# Altium footprint library IC-QFN.PcbLib: 94 footprints (part 2 of 6)
Each footprint in its own frame and in the unit in brackets; x right, y up, seen from the top. Pads: shape width x height; smd on the part's side, far side on the other; paste and mask are expansions set on the pad; w line width, h text height; cw(c..) or ccw(c..) is an arc to the next point about the centre after c.
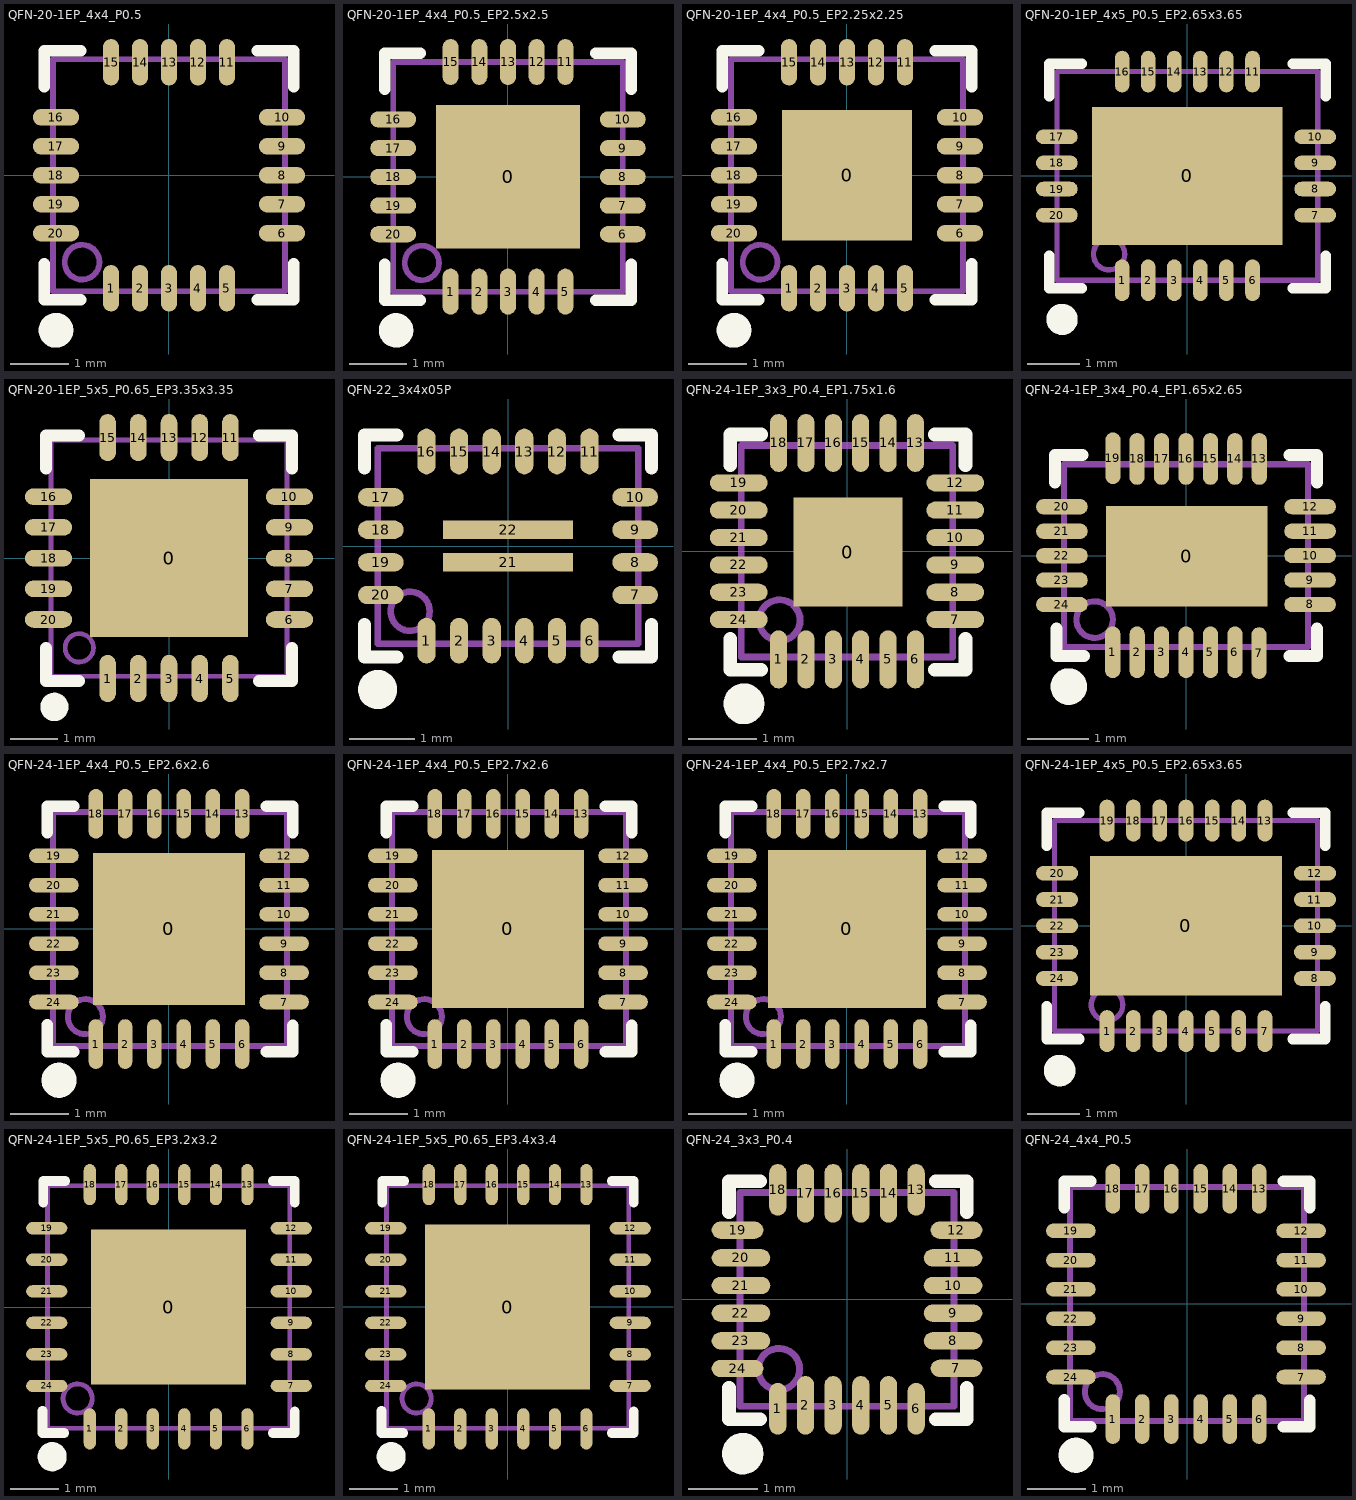
[diagram p1: the footprints below, top view; thin cyan lines are the x and y axes]

## QFN-20-1EP_4x4_P0.5 [mm]
pads (20):
  oval 0.28x0.8 smd mask+0.051: 1(-1,-1.95) 2(-0.5,-1.95) 3(0,-1.95) 4(0.5,-1.95) 5(1,-1.95) 11(1,1.95) 12(0.5,1.95) 13(0,1.95) 14(-0.5,1.95) 15(-1,1.95)
  oval 0.8x0.28 smd mask+0.051: 6(1.95,-1) 7(1.95,-0.5) 8(1.95,0) 9(1.95,0.5) 10(1.95,1) 16(-1.95,1) 17(-1.95,0.5) 18(-1.95,0) 19(-1.95,-0.5) 20(-1.95,-1)
Top Overlay:
  circle w0.3: c-1.95,-2.675 r0.15
  lines w0.2: -2.15,-1.525 -2.15,-2.15 -1.525,-2.15 ; -2.15,1.525 -2.15,2.15 -1.525,2.15 ; 1.525,-2.15 2.15,-2.15 2.15,-1.525 ; 1.525,2.15 2.15,2.15 2.15,1.525
Mechanical 13:
  circle w0.1: c-1.5,-1.5 r0.3
  lines w0.1: -2,-2 2,-2 2,2 -2,2 -2,-2
3D body "QFN-20-1EP_4x4mm_P0.5mm.step": height 0.78, standoff 0, extent -2,-2 2,2

## QFN-20-1EP_4x4_P0.5_EP2.5x2.5 [mm]
pads (21):
  rect 2.5x2.5 smd mask+0.051: 0(0,0)
  oval 0.28x0.8 smd mask+0.051: 1(-1,-2) 2(-0.5,-2) 3(0,-2) 4(0.5,-2) 5(1,-2) 11(1,2) 12(0.5,2) 13(0,2) 14(-0.5,2) 15(-1,2)
  oval 0.8x0.28 smd mask+0.051: 6(2,-1) 7(2,-0.5) 8(2,0) 9(2,0.5) 10(2,1) 16(-2,1) 17(-2,0.5) 18(-2,0) 19(-2,-0.5) 20(-2,-1)
Top Overlay:
  circle w0.3: c-1.95,-2.675 r0.15
  lines w0.2: -2.15,-1.525 -2.15,-2.15 -1.525,-2.15 ; -2.15,1.525 -2.15,2.15 -1.525,2.15 ; 1.525,-2.15 2.15,-2.15 2.15,-1.525 ; 1.525,2.15 2.15,2.15 2.15,1.525
Mechanical 13:
  circle w0.1: c-1.5,-1.5 r0.3
  lines w0.1: -2,-2 2,-2 2,2 -2,2 -2,-2
3D body "QFN-20-1EP_4x4mm_P0.5mm_EP2.5x2.5mm.step": height 0.77, standoff 0, extent -2,-2 2,2

## QFN-20-1EP_4x4_P0.5_EP2.25x2.25 [mm]
pads (21):
  rect 2.25x2.25 smd mask+0.051: 0(0,0)
  oval 0.28x0.8 smd mask+0.051: 1(-1,-1.95) 2(-0.5,-1.95) 3(0,-1.95) 4(0.5,-1.95) 5(1,-1.95) 11(1,1.95) 12(0.5,1.95) 13(0,1.95) 14(-0.5,1.95) 15(-1,1.95)
  oval 0.8x0.28 smd mask+0.051: 6(1.95,-1) 7(1.95,-0.5) 8(1.95,0) 9(1.95,0.5) 10(1.95,1) 16(-1.95,1) 17(-1.95,0.5) 18(-1.95,0) 19(-1.95,-0.5) 20(-1.95,-1)
Top Overlay:
  circle w0.3: c-1.95,-2.675 r0.15
  lines w0.2: -2.15,-1.525 -2.15,-2.15 -1.525,-2.15 ; -2.15,1.525 -2.15,2.15 -1.525,2.15 ; 1.525,-2.15 2.15,-2.15 2.15,-1.525 ; 1.525,2.15 2.15,2.15 2.15,1.525
Mechanical 13:
  circle w0.1: c-1.5,-1.5 r0.3
  lines w0.1: -2,-2 2,-2 2,2 -2,2 -2,-2
3D body "QFN-20-1EP_4x4mm_P0.5mm_EP2.25x2.25mm.step": height 1.1, standoff 0, extent -2,-2 2,2

## QFN-20-1EP_4x5_P0.5_EP2.65x3.65 [mm]
pads (21):
  rect 3.65x2.65 smd mask+0.051: 0(0,0)
  oval 0.28x0.8 smd mask+0.051: 1(-1.25,-2) 2(-0.75,-2) 3(-0.25,-2) 4(0.25,-2) 5(0.75,-2) 6(1.25,-2) 11(1.25,2) 12(0.75,2) 13(0.25,2) 14(-0.25,2) 15(-0.75,2) 16(-1.25,2)
  oval 0.8x0.28 smd mask+0.051: 7(2.45,-0.75) 8(2.45,-0.25) 9(2.45,0.25) 10(2.45,0.75) 17(-2.5,0.75) 18(-2.5,0.25) 19(-2.5,-0.25) 20(-2.5,-0.75)
Top Overlay:
  circle w0.3: c-2.4,-2.75 r0.15
  lines w0.2: -2.65,-1.525 -2.65,-2.15 -2.025,-2.15 ; -2.65,1.525 -2.65,2.15 -2.025,2.15 ; 2.025,-2.15 2.65,-2.15 2.65,-1.525 ; 2.025,2.15 2.65,2.15 2.65,1.525
Mechanical 13:
  circle w0.1: c-1.5,-1.5 r0.3
  lines w0.1: -2.5,-2 -2.5,2 2.5,2 2.5,-2 -2.5,-2
3D body "QFN-20-1EP_4x5mm_P0.5mm_EP2.65x3.65mm.step": height 0.77, standoff 0, extent -2.5,-2 2.5,2

## QFN-20-1EP_5x5_P0.65_EP3.35x3.35 [mm]
pads (21):
  rect 3.35x3.35 smd mask+0.051: 0(0,0)
  oval 0.35x1 smd mask+0.051: 1(-1.3,-2.55) 2(-0.65,-2.55) 3(0,-2.55) 4(0.65,-2.55) 5(1.3,-2.55) 11(1.3,2.55) 12(0.65,2.55) 13(0,2.55) 14(-0.65,2.55) 15(-1.3,2.55)
  oval 1x0.35 smd mask+0.051: 6(2.55,-1.3) 7(2.55,-0.65) 8(2.55,0) 9(2.55,0.65) 10(2.55,1.3) 16(-2.55,1.3) 17(-2.55,0.65) 18(-2.55,0) 19(-2.55,-0.65) 20(-2.55,-1.3)
Top Overlay:
  circle w0.3: c-2.425,-3.15 r0.15
  lines w0.254: -2.6,-1.9 -2.6,-2.6 -1.9,-2.6 ; -2.6,1.9 -2.6,2.6 -1.9,2.6 ; 1.9,-2.6 2.6,-2.6 2.6,-1.9 ; 1.9,2.6 2.6,2.6 2.6,1.9
Mechanical 13:
  circle w0.1: c-1.9,-1.9 r0.3
  lines w0.1: -2.5,-2.5 -2.5,2.5 2.5,2.5 2.5,-2.5 -2.5,-2.5
3D body "QFN-20-1EP_5x5mm_P0.65mm_EP3.35x3.35mm.step": height 0.77, standoff 0, extent -2.5,-2.5 2.5,2.5

## QFN-22_3x4x05P [mm]
pads (22):
  oval 0.28x0.7 smd mask+0.051: 1(-1.25,-1.45) 2(-0.75,-1.45) 3(-0.25,-1.45) 4(0.25,-1.45) 5(0.75,-1.45) 6(1.25,-1.45) 11(1.25,1.45) 12(0.75,1.45) 13(0.25,1.45) 14(-0.25,1.45) 15(-0.75,1.45) 16(-1.25,1.45)
  oval 0.7x0.28 smd mask+0.051: 7(1.95,-0.75) 8(1.95,-0.25) 9(1.95,0.25) 10(1.95,0.75) 17(-1.95,0.75) 18(-1.95,0.25) 19(-1.95,-0.25) 20(-1.95,-0.75)
  rect 2x0.28 smd mask+0.051: 21(0,-0.25) 22(0,0.25)
Top Overlay:
  circle w0.3: c-2,-2.2 r0.15
  lines w0.2: -2.2,-1.2 -2.2,-1.7 -1.7,-1.7 ; -2.2,1.2 -2.2,1.7 -1.7,1.7 ; 1.7,-1.7 2.2,-1.7 2.2,-1.2 ; 1.7,1.7 2.2,1.7 2.2,1.2
Mechanical 13:
  circle w0.1: c-1.5,-1 r0.3
  lines w0.1: -2,-1.5 2,-1.5 2,1.5 -2,1.5 -2,-1.5

## QFN-24-1EP_3x3_P0.4_EP1.75x1.6 [mm]
pads (25):
  rect 1.6x1.6 smd mask+0.051: 0(0.013,-0.013)
  oval 0.25x0.85 smd mask+0.051: 1(-1.003,-1.587) 2(-0.602,-1.587) 3(-0.201,-1.587) 4(0.201,-1.587) 5(0.602,-1.587) 6(1.003,-1.587) 13(1.003,1.588) 14(0.602,1.588) 15(0.201,1.588) 16(-0.201,1.588) 17(-0.602,1.588) 18(-1.003,1.588)
  oval 0.85x0.25 smd mask+0.051: 7(1.587,-1.003) 8(1.587,-0.602) 9(1.587,-0.201) 10(1.587,0.201) 11(1.587,0.602) 12(1.587,1.003) 19(-1.587,1.003) 20(-1.587,0.602) 21(-1.587,0.201) 22(-1.587,-0.201) 23(-1.587,-0.602) 24(-1.587,-1.003)
Top Overlay:
  circle w0.3: c-1.512,-2.238 r0.15
  lines w0.2: -1.712,-1.288 -1.712,-1.738 -1.262,-1.738 ; -1.712,1.262 -1.712,1.712 -1.262,1.712 ; 1.288,-1.738 1.738,-1.738 1.738,-1.288 ; 1.288,1.712 1.738,1.712 1.738,1.262
Mechanical 13:
  circle w0.1: c-0.987,-1.013 r0.3
  lines w0.1: -1.55,-1.55 1.55,-1.55 1.55,1.55 -1.55,1.55 -1.55,-1.55
3D body "QFN-24-1EP_3x3mm_P0.4mm_EP1.75x1.6mm.step": height 1.02, standoff 0, extent -1.5,-1.5 1.5,1.5

## QFN-24-1EP_3x4_P0.4_EP1.65x2.65 [mm]
pads (25):
  rect 2.65x1.65 smd mask+0.051: 0(0.013,-0.013)
  oval 0.25x0.85 smd mask+0.051: 1(-1.203,-1.587) 2(-0.802,-1.587) 3(-0.401,-1.587) 4(0.001,-1.587) 5(0.402,-1.587) 6(0.803,-1.587) 7(1.2,-1.6) 13(1.203,1.588) 14(0.802,1.588) 15(0.401,1.588) 16(-0.001,1.588) 17(-0.402,1.588) 18(-0.803,1.588) 19(-1.2,1.6)
  oval 0.85x0.25 smd mask+0.051: 8(2.038,-0.802) 9(2.038,-0.401) 10(2.038,0.001) 11(2.038,0.402) 12(2.038,0.803) 20(-2.038,0.802) 21(-2.038,0.401) 22(-2.038,-0.001) 23(-2.038,-0.402) 24(-2.038,-0.803)
Top Overlay:
  circle w0.3: c-1.925,-2.15 r0.15
  lines w0.2: -2.15,1.2 -2.15,1.65 -1.7,1.65 ; -2.125,-1.2 -2.125,-1.65 -1.675,-1.65 ; 1.7,-1.65 2.15,-1.65 2.15,-1.2 ; 1.7,1.65 2.15,1.65 2.15,1.2
Mechanical 13:
  circle w0.1: c-1.5,-1.05 r0.3
  lines w0.1: -2,-1.5 -2,1.5 2,1.5 2,-1.5 -2,-1.5
3D body "QFN-24-1EP_3x4mm_P0.4mm_EP1.65x2.65mm.step": height 0.77, standoff 0, extent -2,-1.5 2,1.5

## QFN-24-1EP_4x4_P0.5_EP2.6x2.6 [mm]
pads (25):
  rect 2.6x2.6 smd mask+0.051: 0(0,0)
  oval 0.25x0.85 smd mask+0.051: 1(-1.25,-1.969) 2(-0.75,-1.969) 3(-0.25,-1.969) 4(0.25,-1.969) 5(0.75,-1.969) 6(1.25,-1.969) 13(1.25,1.969) 14(0.75,1.969) 15(0.25,1.969) 16(-0.25,1.969) 17(-0.75,1.969) 18(-1.25,1.969)
  oval 0.85x0.25 smd mask+0.051: 7(1.969,-1.25) 8(1.969,-0.75) 9(1.969,-0.25) 10(1.969,0.25) 11(1.969,0.75) 12(1.969,1.25) 19(-1.969,1.25) 20(-1.969,0.75) 21(-1.969,0.25) 22(-1.969,-0.25) 23(-1.969,-0.75) 24(-1.969,-1.25)
Top Overlay:
  circle w0.3: c-1.881,-2.588 r0.15
  lines w0.2: -2.081,-2.1 -1.631,-2.1 ; -2.081,-2.088 -2.081,-1.638 ; -2.081,1.65 -2.081,2.1 -1.631,2.1 ; 1.669,-2.1 2.119,-2.1 2.119,-1.65 ; 1.669,2.1 2.119,2.1 2.119,1.65
Mechanical 13:
  circle w0.1: c-1.431,-1.5 r0.3
  lines w0.1: -1.981,-2 2.019,-2 2.019,2 -1.981,2 -1.981,-2
3D body "QFN-24-1EP_4x4mm_P0.5mm_EP2.6x2.6mm.step": height 0.77, standoff 0, extent -1.981,-2 2.019,2

## QFN-24-1EP_4x4_P0.5_EP2.7x2.6 [mm]
pads (25):
  rect 2.6x2.7 smd mask+0.051: 0(0,0)
  oval 0.25x0.85 smd mask+0.051: 1(-1.25,-1.969) 2(-0.75,-1.969) 3(-0.25,-1.969) 4(0.25,-1.969) 5(0.75,-1.969) 6(1.25,-1.969) 13(1.25,1.969) 14(0.75,1.969) 15(0.25,1.969) 16(-0.25,1.969) 17(-0.75,1.969) 18(-1.25,1.969)
  oval 0.85x0.25 smd mask+0.051: 7(1.969,-1.25) 8(1.969,-0.75) 9(1.969,-0.25) 10(1.969,0.25) 11(1.969,0.75) 12(1.969,1.25) 19(-1.969,1.25) 20(-1.969,0.75) 21(-1.969,0.25) 22(-1.969,-0.25) 23(-1.969,-0.75) 24(-1.969,-1.25)
Top Overlay:
  circle w0.3: c-1.881,-2.588 r0.15
  lines w0.2: -2.081,-2.1 -1.631,-2.1 ; -2.081,-2.088 -2.081,-1.638 ; -2.081,1.65 -2.081,2.1 -1.631,2.1 ; 1.669,-2.1 2.119,-2.1 2.119,-1.65 ; 1.669,2.1 2.119,2.1 2.119,1.65
Mechanical 13:
  circle w0.1: c-1.431,-1.5 r0.3
  lines w0.1: -1.981,-2 2.019,-2 2.019,2 -1.981,2 -1.981,-2
3D body "QFN-24-1EP_4x4mm_P0.5mm_EP2.7x2.6mm.step": height 1.1, standoff 0, extent -2,-2 2,2

## QFN-24-1EP_4x4_P0.5_EP2.7x2.7 [mm]
pads (25):
  rect 2.7x2.7 smd mask+0.051: 0(0,0)
  oval 0.25x0.85 smd mask+0.051: 1(-1.25,-1.969) 2(-0.75,-1.969) 3(-0.25,-1.969) 4(0.25,-1.969) 5(0.75,-1.969) 6(1.25,-1.969) 13(1.25,1.969) 14(0.75,1.969) 15(0.25,1.969) 16(-0.25,1.969) 17(-0.75,1.969) 18(-1.25,1.969)
  oval 0.85x0.25 smd mask+0.051: 7(1.969,-1.25) 8(1.969,-0.75) 9(1.969,-0.25) 10(1.969,0.25) 11(1.969,0.75) 12(1.969,1.25) 19(-1.969,1.25) 20(-1.969,0.75) 21(-1.969,0.25) 22(-1.969,-0.25) 23(-1.969,-0.75) 24(-1.969,-1.25)
Top Overlay:
  circle w0.3: c-1.881,-2.588 r0.15
  lines w0.2: -2.081,-2.1 -1.631,-2.1 ; -2.081,-2.088 -2.081,-1.638 ; -2.081,1.65 -2.081,2.1 -1.631,2.1 ; 1.669,-2.1 2.119,-2.1 2.119,-1.65 ; 1.669,2.1 2.119,2.1 2.119,1.65
Mechanical 13:
  circle w0.1: c-1.431,-1.5 r0.3
  lines w0.1: -1.981,-2 -1.981,2 2.019,2 2.019,-2 -1.981,-2
3D body "QFN-24-1EP_4x4mm_P0.5mm_EP2.7x2.7mm.step": height 1.1, standoff 0, extent -2,-2 2,2

## QFN-24-1EP_4x5_P0.5_EP2.65x3.65 [mm]
pads (25):
  rect 3.65x2.65 smd mask+0.051: 0(0,0)
  oval 0.28x0.8 smd mask+0.051: 1(-1.5,-2) 2(-1,-2) 3(-0.5,-2) 4(0,-2) 5(0.5,-2) 6(1,-2) 7(1.5,-2) 13(1.5,2) 14(1,2) 15(0.5,2) 16(0,2) 17(-0.5,2) 18(-1,2) 19(-1.5,2)
  oval 0.8x0.28 smd mask+0.051: 8(2.45,-1) 9(2.45,-0.5) 10(2.45,0) 11(2.45,0.5) 12(2.45,1) 20(-2.45,1) 21(-2.45,0.5) 22(-2.45,0) 23(-2.45,-0.5) 24(-2.45,-1)
Top Overlay:
  circle w0.3: c-2.4,-2.75 r0.15
  lines w0.2: -2.65,-1.525 -2.65,-2.15 -2.025,-2.15 ; -2.65,1.525 -2.65,2.15 -2.025,2.15 ; 2.025,-2.15 2.65,-2.15 2.65,-1.525 ; 2.025,2.15 2.65,2.15 ; 2.65,1.525 2.65,2.15
Mechanical 13:
  circle w0.1: c-1.5,-1.5 r0.3
  lines w0.1: -2.5,-2 2.5,-2 2.5,2 -2.5,2 -2.5,-2
3D body "QFN-24-1EP_4x5mm_P0.5mm_EP2.65x3.65mm.step": height 0.77, standoff 0, extent -2.5,-2 2.5,2

## QFN-24-1EP_5x5_P0.65_EP3.2x3.2 [mm]
pads (25):
  rect 3.2x3.2 smd mask+0.051: 0(0,0)
  oval 0.25x0.85 smd mask+0.051: 1(-1.625,-2.513) 2(-0.975,-2.513) 3(-0.325,-2.513) 4(0.325,-2.513) 5(0.975,-2.513) 6(1.625,-2.513) 13(1.625,2.525) 14(0.975,2.525) 15(0.325,2.525) 16(-0.325,2.525) 17(-0.975,2.525) 18(-1.625,2.525)
  oval 0.85x0.25 smd mask+0.051: 7(2.531,-1.625) 8(2.531,-0.975) 9(2.531,-0.325) 10(2.531,0.325) 11(2.531,0.975) 12(2.531,1.625) 19(-2.513,1.625) 20(-2.513,0.975) 21(-2.513,0.325) 22(-2.513,-0.325) 23(-2.513,-0.975) 24(-2.513,-1.625)
Top Overlay:
  circle w0.3: c-2.4,-3.088 r0.15
  lines w0.2: -2.6,-2.6 -2.15,-2.6 ; -2.6,-2.588 -2.6,-2.138 ; -2.581,2.15 -2.581,2.6 -2.131,2.6 ; 2.15,-2.6 2.6,-2.6 2.6,-2.15 ; 2.15,2.6 2.6,2.6 2.6,2.15
Mechanical 13:
  circle w0.1: c-1.875,-1.887 r0.3
  lines w0.1: -2.5,-2.5 -2.5,2.5 2.5,2.5 2.5,-2.5 -2.5,-2.5
3D body "QFN-24-1EP_5x5mm_P0.65mm_EP3.2x3.2mm.step": height 0.77, standoff 0, extent -2.5,-2.5 2.5,2.5

## QFN-24-1EP_5x5_P0.65_EP3.4x3.4 [mm]
pads (25):
  rect 3.4x3.4 smd mask+0.051: 0(-0.009,-0.006)
  oval 0.25x0.85 smd mask+0.051: 1(-1.634,-2.519) 2(-0.984,-2.519) 3(-0.334,-2.519) 4(0.316,-2.519) 5(0.966,-2.519) 6(1.616,-2.519) 13(1.616,2.519) 14(0.966,2.519) 15(0.316,2.519) 16(-0.334,2.519) 17(-0.984,2.519) 18(-1.634,2.519)
  oval 0.85x0.25 smd mask+0.051: 7(2.522,-1.631) 8(2.522,-0.981) 9(2.522,-0.331) 10(2.522,0.319) 11(2.522,0.969) 12(2.522,1.619) 19(-2.522,1.619) 20(-2.522,0.969) 21(-2.522,0.319) 22(-2.522,-0.331) 23(-2.522,-0.981) 24(-2.522,-1.631)
Top Overlay:
  circle w0.3: c-2.409,-3.094 r0.15
  lines w0.2: -2.609,-2.606 -2.159,-2.606 ; -2.609,-2.594 -2.609,-2.144 ; -2.591,2.144 -2.591,2.594 -2.141,2.594 ; 2.141,-2.606 2.591,-2.606 2.591,-2.156 ; 2.141,2.594 2.591,2.594 2.591,2.144
Mechanical 13:
  circle w0.1: c-1.884,-1.894 r0.3
  lines w0.1: -2.509,-2.506 -2.509,2.494 2.491,2.494 2.491,-2.506 -2.509,-2.506
3D body "QFN-24-1EP_5x5mm_P0.65mm_EP3.4x3.4mm.step": height 1.1, standoff 0, extent -2.509,-2.506 2.491,2.494

## QFN-24_3x3_P0.4 [mm]
pads (24):
  oval 0.25x0.75 smd mask+0.051: 1(-1.003,-1.587) 6(1.003,-1.587) 13(1.003,1.588) 18(-1.003,1.588)
  oval 0.25x0.85 smd mask+0.051: 2(-0.602,-1.537) 3(-0.201,-1.537) 4(0.201,-1.537) 5(0.602,-1.537) 14(0.602,1.538) 15(0.201,1.538) 16(-0.201,1.538) 17(-0.602,1.538)
  oval 0.75x0.25 smd mask+0.051: 7(1.587,-1) 12(1.587,1.003) 19(-1.587,1.003) 24(-1.587,-1.003)
  oval 0.85x0.25 smd mask+0.051: 8(1.538,-0.602) 9(1.538,-0.201) 10(1.538,0.201) 11(1.538,0.602) 20(-1.538,0.602) 21(-1.538,0.201) 22(-1.538,-0.201) 23(-1.538,-0.602)
Top Overlay:
  circle w0.3: c-1.512,-2.238 r0.15
  lines w0.2: -1.712,-1.288 -1.712,-1.738 -1.262,-1.738 ; -1.712,1.262 -1.712,1.712 -1.262,1.712 ; 1.288,-1.738 1.738,-1.738 1.738,-1.288 ; 1.288,1.712 1.738,1.712 1.738,1.262
Mechanical 13:
  circle w0.1: c-0.987,-1.013 r0.3
  lines w0.1: -1.55,-1.55 -1.55,1.55 1.55,1.55 1.55,-1.55 -1.55,-1.55
3D body "QFN-24_3x3mm_P0.4mm.step": height 1.02, standoff 0, extent -1.5,-1.5 1.5,1.5

## QFN-24_4x4_P0.5 [mm]
pads (24):
  oval 0.25x0.85 smd mask+0.051: 1(-1.269,-1.969) 2(-0.769,-1.969) 3(-0.269,-1.969) 4(0.231,-1.969) 5(0.731,-1.969) 6(1.231,-1.969) 13(1.231,1.969) 14(0.731,1.969) 15(0.231,1.969) 16(-0.269,1.969) 17(-0.769,1.969) 18(-1.269,1.969)
  oval 0.85x0.25 smd mask+0.051: 7(1.95,-1.25) 8(1.95,-0.75) 9(1.95,-0.25) 10(1.95,0.25) 11(1.95,0.75) 12(1.95,1.25) 19(-1.987,1.25) 20(-1.987,0.75) 21(-1.987,0.25) 22(-1.987,-0.25) 23(-1.987,-0.75) 24(-1.987,-1.25)
Top Overlay:
  circle w0.3: c-1.9,-2.588 r0.15
  lines w0.2: -2.1,-2.1 -1.65,-2.1 ; -2.1,-2.088 -2.1,-1.638 ; -2.1,1.65 -2.1,2.1 -1.65,2.1 ; 1.65,-2.1 2.1,-2.1 2.1,-1.65 ; 1.65,2.1 2.1,2.1 2.1,1.65
Mechanical 13:
  circle w0.1: c-1.45,-1.5 r0.3
  lines w0.1: -2,-2 2,-2 2,2 -2,2 -2,-2
3D body "QFN-24_4x4mm_P0.5mm.step": height 0.77, standoff 0, extent -2,-2 2,2